# Altium schematic symbol library MAX17222ELT+T.SchLib: 1 symbol
Pins are listed as number, name and electrical type; pins without a type are passive.

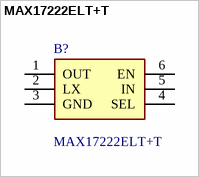
[diagram p0: symbol MAX17222ELT+T]

## MAX17222ELT+T
designator B?
Boost Switching Regulator IC Positive Adjustable 1.8V 1 Output 500mA (Switch) 6-WDFN; Manufacturer_Name: Analog Devices; Geometry.Height: 0.8mm; Mouser Part Number: 700-MAX17222ELT+T; Mouser Price/Stock: https://www.mouser.co.uk/ProductDetail/Analog-Devices-Maxim-Integrated/MAX17222ELT%2bT?qs=u4fy%2FsgLU9PcvsZj65z6yw%3D%3D; Manufacturer_Part_Number: MAX17222ELT+T; Datasheet Link: https://www.analog.com/MAX17222/datasheet
footprint MAX17222ELTT
pins: 1 OUT, 2 LX, 3 GND, 4 SEL, 5 IN, 6 EN